# Altium footprint library 2020-05-10_12-35-11.PcbLib: 1 footprints
Each footprint in its own frame and in the unit in brackets; x right, y up, seen from the top. Pads: shape width x height; smd on the part's side, far side on the other; paste and mask are expansions set on the pad; w line width, h text height; cw(c..) or ccw(c..) is an arc to the next point about the centre after c.
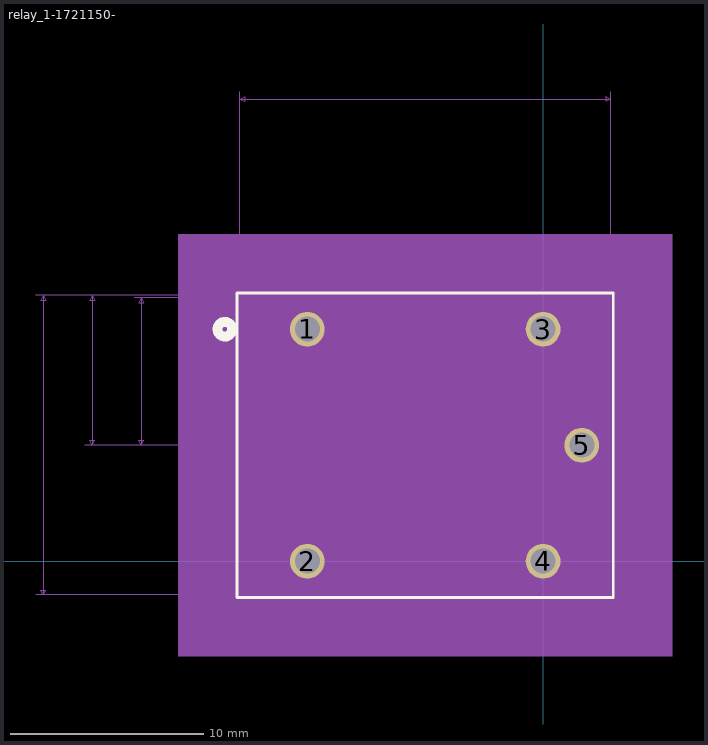
[diagram p0: the footprint, top view; thin cyan lines are the x and y axes]

## relay_1-1721150- [mil]
pads (5):
  round 71 hole 51 mask+0: 1(-480.31,472.44) 2(-480.31,0) 3(0,472.44) 4(0,0) 5(78.74,236.22)
Top Overlay:
  circle w20: c-648.16,472.44 r15
  lines w6: -623.16,-73.78 142.84,-73.78 142.84,546.22 -623.16,546.22 -623.16,-73.78
Bottom Overlay:
  circle w20: c-648.16,472.44 r15
Mechanical 5:
  region: -743.16,666.22 262.84,666.22 262.84,-193.78 -743.16,-193.78
Mechanical 7:
  lines w1: -1033.16,-68.78 -618.16,-68.78 ; -1033.16,541.22 -618.16,541.22 ; -933.16,236.22 -240.16,236.22 ; -933.16,541.22 -618.16,541.22 ; -833.16,236.22 -240.16,236.22 ; -833.16,536.22 109.84,536.22 ; -733.16,136.22 209.84,136.22 ; -733.16,236.22 -240.16,236.22 ; -718.16,86.22 -718.16,136.22 ; -718.16,286.22 -718.16,236.22 ; -618.16,956.22 -618.16,541.22 ; -480.31,0 252.84,0 ; -480.31,656.22 -480.31,472.44 252.84,472.44 ; 0,472.44 0,656.22 ; 137.84,541.22 137.84,956.22 ; -1018.16,-68.78 -1018.16,541.22 ; -1018.16,-68.78 -1023.16,-58.78 -1013.16,-58.78 -1018.16,-68.78 ; -1018.16,541.22 -1023.16,531.22 -1013.16,531.22 -1018.16,541.22 ; -918.16,236.22 -918.16,541.22 ; -918.16,236.22 -923.16,246.22 -913.16,246.22 -918.16,236.22 ; -918.16,541.22 -923.16,531.22 -913.16,531.22 -918.16,541.22 ; -818.16,236.22 -818.16,536.22 ; -818.16,236.22 -823.16,246.22 -813.16,246.22 -818.16,236.22 ; -818.16,536.22 -823.16,526.22 -813.16,526.22 -818.16,536.22 ; -718.16,136.22 -723.16,126.22 -713.16,126.22 -718.16,136.22 ; -718.16,236.22 -723.16,246.22 -713.16,246.22 -718.16,236.22 ; -618.16,941.22 137.84,941.22 ; -618.16,941.22 -608.16,946.22 -608.16,936.22 -618.16,941.22 ; -480.31,641.22 0,641.22 ; -480.31,641.22 -470.31,646.22 -470.31,636.22 -480.31,641.22 ; 0,641.22 -10,646.22 -10,636.22 0,641.22 ; 137.84,941.22 127.84,946.22 127.84,936.22 137.84,941.22 ; 237.84,0 237.84,472.44 ; 237.84,0 232.84,10 242.84,10 237.84,0 ; 237.84,472.44 232.84,462.44 242.84,462.44 237.84,472.44
  text "Default Padstyle: EX71Y71D51P" at -602.66,-218.78 h50
  text "1st Mtg Padstyle: RX80Y80D50P" at -602.66,-293.78 h50
  text "2nd Mtg Padstyle: EX70Y70D70P" at -602.66,-368.78 h50
  text "3rd Mtg Padstyle: EX70Y70D70P" at -602.66,-443.78 h50
  text "Left Mtg Padstyle: EX60Y60D30P" at -615.16,-518.78 h50
  text "Right Mtg Padstyle: EX60Y60D30P" at -627.66,-593.78 h50
  text "Alt Padstyle 1: OX60Y90D30P" at -577.66,-668.78 h50
  text "Alt Padstyle 2: OX90Y60D30P" at -577.66,-743.78 h50
  text "0.48in/12.2mm" at -321.41,661.22 h25
  text "0.756in/19.202mm" at -340.16,961.22 h25
  text "0.472in/12mm" at 257.84,223.72 h25
  text "-0.1in/-2.54mm" at -913.16,173.72 h25
  text "0.3in/7.62mm" at -988.16,373.72 h25
  text "0.305in/7.747mm" at -1125.66,376.22 h25
  text "0.61in/15.494mm" at -1187.5,187.5 h25
Mechanical 13:
  circle w20: c-480.31,547.44 r15
  lines w1: -618.16,-68.78 137.84,-68.78 137.84,541.22 -618.16,541.22 -618.16,-68.78
Mechanical 15:
  region: 147.84,551.22 -628.16,551.22 -628.16,-78.78 147.84,-78.78
  region: 137.84,541.22 -618.16,541.22 -618.16,-68.78 137.84,-68.78
  lines w6: -628.16,-78.78 -628.16,551.22 147.84,551.22 147.84,-78.78 -628.16,-78.78
3D body: height 10, standoff 0, extent 0,0 10,10